# Altium schematic symbol library RC0805FR-074K7L.SchLib: 1 symbol
Pins are listed as number, name and electrical type; pins without a type are passive.

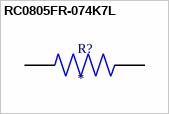
[diagram p0: symbol RC0805FR-074K7L]

## RC0805FR-074K7L
designator R?
4.7 kOhms Â±1% 0.125W, 1/8W Chip Resistor 0805 (2012 Metric) Moisture Resistant Thick Film; MP: RC0805FR-074K7L; MF: Yageo; Check_prices: https://www.snapeda.com/parts/RC0805FR-074K7L/Yageo/view-part/?ref=eda; Value: *; Availability: In Stock; Price: None; Package: 2012 Rohm Semiconductor; SnapEDA_Link: https://www.snapeda.com/parts/RC0805FR-074K7L/Yageo/view-part/?ref=snap; Purchase-URL: https://pricing.snapeda.com/search/part/RC0805FR-074K7L/?ref=eda
footprint RESC2012X60N
pins: 1, 2